# Altium integrated library 1843871.IntLib: 1 symbol
Pins are listed as number, name and electrical type; pins without a type are passive.

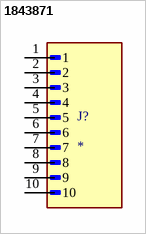
[diagram p0: symbol 1843871]

## 1843871
designator J?
Pluggable Header 3.5mm 16AWG 160V 8A 10 Position COMBICON MC Series | Phoenix Contact 1843871; SnapEDA_Link: https://www.snapeda.com/parts/1843871/Phoenix+Contact/view-part/?ref=snap; Package: None; Value: *; MF: Phoenix Contact; MP: 1843871; Check_prices: https://www.snapeda.com/parts/1843871/Phoenix+Contact/view-part/?ref=eda
footprint PHOENIX_1843871
pins: 1, 2, 3, 4, 5, 6, 7, 8, 9, 10